# Altium schematic symbol library 2019-09-13_04-08-47.SchLib: 2 symbols
Pins are listed as number, name and electrical type; pins without a type are passive.

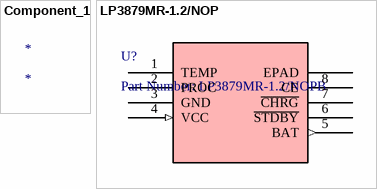
[diagram p0: symbols Component_1 to LP3879MR-1.2/NOP]

## Component_1
designator *

## LP3879MR-1.2/NOP
designator U?, comment Part Number: LP3879MR-1.2/NOPB
No Description Available; Vendor: Texas Instruments; Built_By: EMA_UL_Team; Manufacturer_Part_Number: LP3879MR-1.2/NOPB; Copyright: Copyright (C) 2018 Accelerated Designs. All rights reserved; RefDes: RefDes; Type: DEV; Value: Value
footprint MRA08A
pins: 1 TEMP, 2 PROC, 3 GND, 4 VCC (in), 5 BAT (out), 6 ~{STDBY}, 7 ~{CHRG}, 8 CE, EPAD